# Altium footprint library Dlib.PcbLib: 70 footprints (part 3 of 5)
Each footprint in its own frame and in the unit in brackets; x right, y up, seen from the top. Pads: shape width x height; smd on the part's side, far side on the other; paste and mask are expansions set on the pad; w line width, h text height; cw(c..) or ccw(c..) is an arc to the next point about the centre after c.
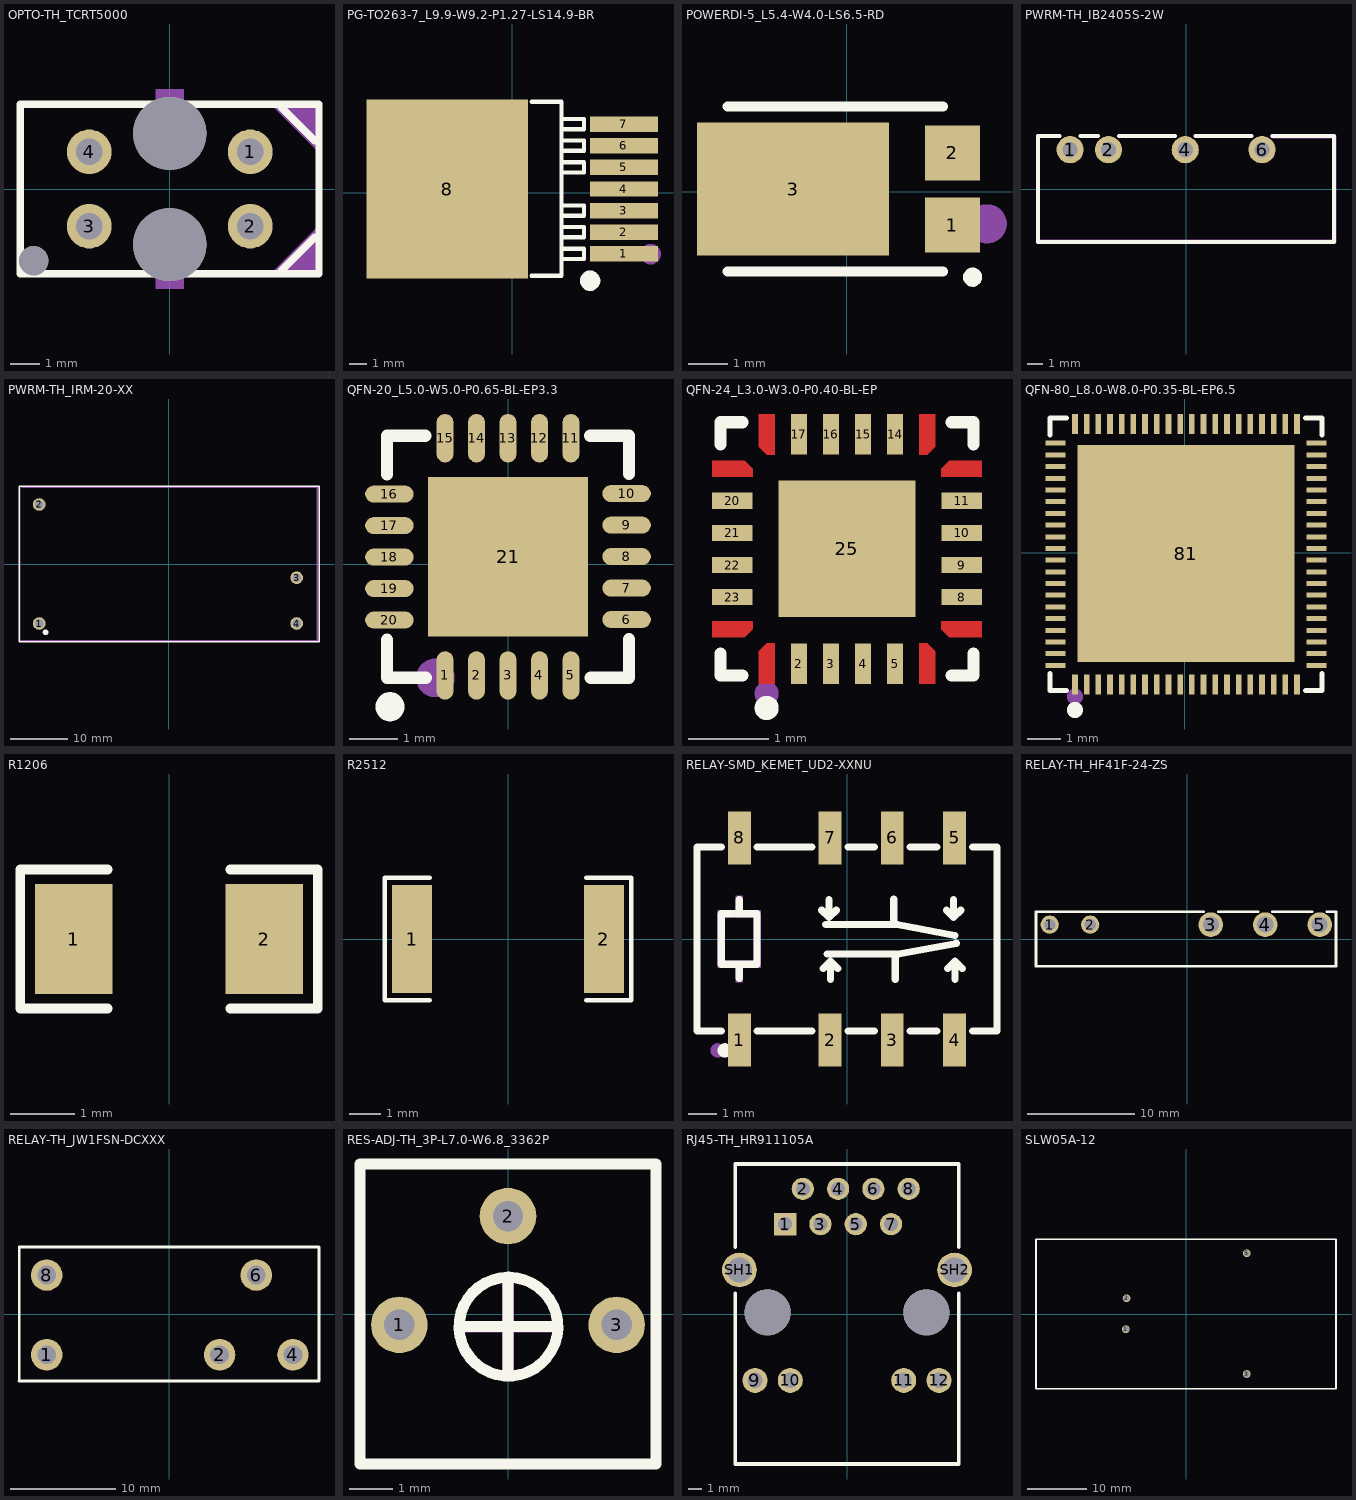
[diagram p2: the footprints below, top view; thin cyan lines are the x and y axes]

## OPTO-TH_TCRT5000 [mil]
pads (7):
  round 60 hole 36 paste-99999 mask+1.97: 1(108.27,50) 2(108.27,-50) 3(-108.26,-50) 4(-108.26,50)
  round 39.37 hole 39.37 unplated paste-99999: ""(-183.06,-96.46)
  round 98.43 hole 98.43 unplated paste-99999: ""(0.01,-74.8) ""(0.01,74.8)
Top Overlay:
  lines w10: 150,-110 195,-65 ; 150,110 195,65 ; -200.78,-114.18 -200.78,114.17 200.78,114.17 200.78,-114.18 -200.78,-114.18
Mechanical 15:
  circle w17.72: c-183.06,-96.46 r8.86
  region: 135.83,-114.17 200.79,-49.21 200.79,-114.17
  region: 135.83,114.17 200.79,49.21 200.79,114.17
  region: 18.71,-133.85 18.71,-86.61 -18.7,-86.61 -18.7,-133.85
  region: 18.71,86.61 18.71,133.86 -18.7,133.86 -18.7,86.61

## PG-TO263-7_L9.9-W9.2-P1.27-LS14.9-BR [mm]
pads (8):
  rect 4x0.9 smd paste+0 mask+0.051: 1(6.565,-3.594) 2(6.565,-2.324) 3(6.565,-1.054) 4(6.565,0.216) 5(6.565,1.486) 6(6.565,2.756) 7(6.565,4.026)
  rect 9.5x10.5 smd paste+0 mask+0.051: 8(-3.815,0.216)
Top Overlay:
  circle w0.6: c4.575,-5.173 r0.3
  lines w0.254: 1.135,-4.884 2.895,-4.884 2.895,-4.784 2.895,5.346 1.155,5.346 ; 2.895,-3.919 2.895,-3.894 4.215,-3.894 4.215,-3.288 2.895,-3.288 ; 2.895,-2.649 2.895,-2.624 4.215,-2.624 4.215,-2.018 2.895,-2.018 ; 2.895,-1.379 2.895,-1.354 4.215,-1.354 4.215,-0.749 2.895,-0.749 ; 2.895,1.161 2.895,1.186 4.215,1.186 4.215,1.792 2.895,1.792 ; 2.895,2.431 2.895,2.456 4.215,2.456 4.215,3.061 2.895,3.061 ; 2.895,3.701 2.895,3.726 4.215,3.726 4.215,4.332 2.895,4.332
Mechanical 15:
  circle w0.6: c8.135,-3.614 r0.3
3D body "BTS7960B--3DModel-STEP-1.STEP": height 4.4, standoff 0, extent -7.45,-4.95 7.45,4.95

## POWERDI-5_L5.4-W4.0-LS6.5-RD [mm]
pads (3):
  rect 1.4x1.4 smd paste+0 mask+0.051: 1(2.688,-0.85) 2(2.688,0.99)
  rect 4.9x3.4 smd paste+0 mask+0.051: 3(-1.376,0.07)
Top Overlay:
  circle w0.254: c3.205,-2.18 r0.117
  lines w0.254: -3.044,-2.03 2.456,-2.03 ; -3.044,2.17 2.456,2.17
Mechanical 15:
  circle w0.5: c3.577,-0.819 r0.25

## PWRM-TH_IB2405S-2W [mm]
pads (4):
  round 1.8 hole 1 paste-2539.97 mask+0.051: 1(-7.67,2.6) 2(-5.13,2.6) 4(-0.05,2.6) 6(5.03,2.6)
Top Overlay:
  lines w0.254: -9.8,3.5 -9.8,-3.5 9.8,-3.5 9.8,3.5 5.714,3.5 ; -9.79,3.5 -8.354,3.5 ; -6.986,3.5 -5.814,3.5 ; -4.446,3.5 -0.734,3.5 ; 0.634,3.5 4.346,3.5
Mechanical 15:
  region: -9.673,3.5 -9.673,-3.373 9.673,-3.373 9.673,3.373 5.714,3.373 5.661,3.373 5.587,3.447 5.587,3.553 5.661,3.627 5.714,3.627 9.8,3.627 9.825,3.627 9.872,3.608 9.908,3.572 9.927,3.525 9.927,3.5 9.927,-3.5 9.927,-3.525 9.908,-3.572 9.872,-3.608 9.825,-3.627 9.8,-3.627 -9.8,-3.627 -9.825,-3.627 -9.872,-3.608 -9.908,-3.572 -9.927,-3.525 -9.927,-3.5 -9.927,3.5 -9.927,3.553 -9.853,3.627 -9.747,3.627 -9.673,3.553
3D body "User Library-uploads_pdf_IB_S-2W.STEP": height 10.16, standoff -4.1, extent -9.825,-3.525 9.825,3.525

## PWRM-TH_IRM-20-XX [mm]
pads (4):
  round 2.2 hole 1.5 paste-2539.97 mask+0.051: 1(-22.664,-10.4) 2(-22.664,10.4) 3(22.336,-2.4) 4(22.336,-10.4)
Top Overlay:
  circle w0.5: c-21.553,-11.938 r0.25
  lines w0.254: -26.164,-13.6 26.236,-13.6 26.236,13.6 -26.164,13.6 -26.164,-13.6
Mechanical 15:
  region: -25.944,13.462 -25.944,-13.335 25.872,-13.335 25.872,13.335 -25.69,13.335 -25.743,13.335 -25.817,13.409 -25.817,13.515 -25.743,13.589 -25.69,13.589 25.999,13.589 26.024,13.589 26.071,13.57 26.106,13.534 26.126,13.487 26.126,13.462 26.126,-13.462 26.126,-13.487 26.106,-13.534 26.071,-13.57 26.024,-13.589 25.999,-13.589 -26.071,-13.589 -26.097,-13.589 -26.143,-13.57 -26.179,-13.534 -26.198,-13.487 -26.198,-13.462 -26.198,13.462 -26.198,13.515 -26.124,13.589 -26.019,13.589 -25.944,13.515
3D body "IRM-20-5--3DModel-STEP-269445.STEP": height 24, standoff -3.5, extent -26.111,-13.564 26.289,13.636

## QFN-20_L5.0-W5.0-P0.65-BL-EP3.3 [mm]
pads (21):
  oval 0.35x1 smd paste-100 mask+0.05: 1(-1.3,-2.302) 2(-0.65,-2.302) 3(0,-2.302) 4(0.65,-2.302) 5(1.301,-2.302) 11(1.3,2.598) 12(0.65,2.598) 13(0,2.598) 14(-0.65,2.598) 15(-1.301,2.598)
  oval 1x0.35 smd paste-100 mask+0.05: 6(2.45,-1.147) 7(2.45,-0.497) 8(2.45,0.153) 9(2.45,0.804) 10(2.45,1.454) 16(-2.45,1.443) 17(-2.45,0.793) 18(-2.45,0.143) 19(-2.45,-0.507) 20(-2.45,-1.158)
  rect 3.3x3.3 smd paste-100 mask+0.05: 21(0,0.148)
Top Overlay:
  lines w0.254: -2.5,-1.564 -2.5,-2.352 -1.702,-2.352 ; -2.5,1.85 -2.5,2.648 -1.712,2.648 ; 1.702,2.648 2.5,2.648 2.5,1.86 ; 1.712,-2.352 2.5,-2.352 2.5,-1.553
  lines w0.3: -2.438,-2.798 ccw(c-2.437,-2.948) -2.436,-2.798
Top Paste:
  drawing of 21 lines, arcs and shapes, not listed
Mechanical 15:
  circle w0.4: c-1.5,-2.352 r0.2
3D body "MCP9600T-E_MX.STEP": height 1, standoff 0, extent -2.5,-2.348 2.5,2.652

## QFN-24_L3.0-W3.0-P0.40-BL-EP [mm]
pads (17):
  rect 0.2x0.505 smd paste-100 mask+0.051: 2(456.51,-344.025) 3(456.91,-344.025) 4(457.31,-344.025) 5(457.71,-344.025) 14(457.71,-341.17) 15(457.31,-341.17) 16(456.91,-341.17) 17(456.51,-341.17)
  rect 0.505x0.2 smd paste-100 mask+0.051: 8(458.538,-343.198) 9(458.538,-342.798) 10(458.538,-342.398) 11(458.538,-341.998) 20(455.683,-341.998) 21(455.683,-342.398) 22(455.683,-342.798) 23(455.683,-343.198)
  rect 1.7x1.7 smd paste-100 mask+0.051: 25(457.11,-342.598)
Top Layer:
  region: 456.01,-340.918 456.21,-340.918 456.21,-341.423 456.11,-341.423 456.01,-341.323
  region: 455.43,-343.698 455.836,-343.698 455.936,-343.598 455.935,-343.498 455.43,-343.498
  region: 458.79,-343.698 458.385,-343.698 458.285,-343.598 458.285,-343.498 458.79,-343.498
  region: 458.79,-341.498 458.385,-341.498 458.285,-341.598 458.285,-341.698 458.79,-341.698
  region: 458.211,-340.918 458.011,-340.918 458.011,-341.423 458.111,-341.423 458.211,-341.323
  region: 456.011,-344.278 456.211,-344.278 456.211,-343.773 456.111,-343.772 456.011,-343.872
  region: 458.211,-344.278 458.011,-344.278 458.011,-343.773 458.111,-343.772 458.211,-343.872
  region: 455.43,-341.498 455.836,-341.498 455.936,-341.598 455.935,-341.698 455.43,-341.698
Top Overlay:
  circle w0.15: c456.11,-344.578 r0.075
  lines w0.152: 455.534,-343.9 455.534,-344.174 455.808,-344.174 ; 455.534,-341.295 455.534,-341.022 455.808,-341.022 ; 458.413,-344.174 458.687,-344.174 458.687,-343.9 ; 458.413,-341.022 458.687,-341.022 458.687,-341.295
Top Paste:
  region: 457.61,-340.918 457.61,-341.423 457.81,-341.423 457.81,-340.918
  region: 456.21,-341.423 456.21,-340.918 456.01,-340.918 456.01,-341.323 456.11,-341.423
  region: 456.611,-341.423 456.611,-340.918 456.411,-340.918 456.411,-341.423
  region: 457.21,-340.918 457.21,-341.423 457.41,-341.423 457.41,-340.918
  region: 457.011,-341.423 457.011,-340.918 456.811,-340.918 456.811,-341.423
  region: 458.211,-341.323 458.211,-340.918 458.011,-340.918 458.011,-341.423 458.111,-341.423
  region: 455.43,-341.498 455.43,-341.698 455.935,-341.698 455.936,-341.598 455.836,-341.498
  region: 458.385,-341.498 458.285,-341.598 458.285,-341.698 458.79,-341.698 458.79,-341.498
  region: 455.43,-341.898 455.43,-342.098 455.935,-342.098 455.935,-341.898
  region: 458.79,-342.098 458.79,-341.898 458.285,-341.898 458.285,-342.098
  region: 455.43,-342.298 455.43,-342.498 455.935,-342.498 455.935,-342.298
  region: 458.79,-342.498 458.79,-342.298 458.285,-342.298 458.285,-342.498
  region: 455.43,-342.698 455.43,-342.898 455.935,-342.898 455.935,-342.698
  region: 458.79,-342.898 458.79,-342.698 458.285,-342.698 458.285,-342.898
  region: 455.43,-343.098 455.43,-343.298 455.935,-343.298 455.935,-343.098
  region: 458.79,-343.298 458.79,-343.098 458.285,-343.098 458.285,-343.298
  region: 455.43,-343.498 455.43,-343.698 455.836,-343.698 455.936,-343.598 455.935,-343.498
  region: 458.79,-343.698 458.79,-343.498 458.285,-343.498 458.285,-343.598 458.385,-343.698
  region: 456.211,-343.773 456.111,-343.772 456.011,-343.872 456.011,-344.278 456.211,-344.278
  region: 458.111,-343.772 458.011,-343.773 458.011,-344.278 458.211,-344.278 458.211,-343.872
  region: 457.81,-344.278 457.81,-343.773 457.61,-343.773 457.61,-344.278
  region: 456.411,-343.773 456.411,-344.278 456.611,-344.278 456.611,-343.773
  region: 457.41,-344.278 457.41,-343.773 457.21,-343.773 457.21,-344.278
  region: 457.011,-344.278 457.011,-343.773 456.811,-343.773 456.811,-344.278
  region: 456.391,-341.878 457.831,-341.878 457.831,-343.318 456.391,-343.318
Mechanical 15:
  circle w0.15: c456.11,-344.398 r0.075

## QFN-80_L8.0-W8.0-P0.35-BL-EP6.5 [mm]
pads (81):
  rect 0.17x0.6 smd paste+0 mask+0.051: 1(-3.291,-3.944) 2(-2.941,-3.944) 3(-2.591,-3.944) 4(-2.241,-3.944) 5(-1.891,-3.944) 6(-1.541,-3.944) 7(-1.191,-3.944) 8(-0.841,-3.944) 9(-0.491,-3.944) 10(-0.141,-3.944) 11(0.209,-3.944) 12(0.559,-3.944) 13(0.909,-3.944) 14(1.259,-3.944) 15(1.609,-3.944) 16(1.959,-3.944) 17(2.309,-3.944) 18(2.659,-3.944) 19(3.009,-3.944) 20(3.36,-3.944) 41(3.36,3.856) 42(3.009,3.856) 43(2.659,3.856) 44(2.309,3.856) 45(1.959,3.856) 46(1.609,3.856) 47(1.259,3.856) 48(0.909,3.856) 49(0.559,3.856) 50(0.209,3.856) 51(-0.141,3.856) 52(-0.491,3.856) 53(-0.841,3.856) 54(-1.191,3.856) 55(-1.541,3.856) 56(-1.891,3.856) 57(-2.241,3.856) 58(-2.591,3.856) 59(-2.941,3.856) 60(-3.291,3.856)
  rect 0.6x0.15 smd paste+0 mask+0.051: 21(3.934,-3.369) 22(3.934,-3.019) 23(3.934,-2.669) 24(3.934,-2.319) 25(3.934,-1.969) 26(3.934,-1.619) 27(3.934,-1.269) 28(3.934,-0.919) 29(3.934,-0.569) 30(3.934,-0.219) 31(3.934,0.131) 32(3.934,0.481) 33(3.934,0.831) 34(3.934,1.181) 35(3.934,1.531) 36(3.934,1.881) 37(3.934,2.231) 38(3.934,2.581) 39(3.934,2.931) 40(3.934,3.281) 61(-3.866,3.281) 62(-3.866,2.931) 63(-3.866,2.581) 64(-3.866,2.231) 65(-3.866,1.881) 66(-3.866,1.531) 67(-3.866,1.181) 68(-3.866,0.831) 69(-3.866,0.481) 70(-3.866,0.131) 71(-3.866,-0.219) 72(-3.866,-0.569) 73(-3.866,-0.919) 74(-3.866,-1.269) 75(-3.866,-1.619) 76(-3.866,-1.969) 77(-3.866,-2.319) 78(-3.866,-2.669) 79(-3.866,-3.019) 80(-3.866,-3.369)
  rect 6.5x6.5 smd paste+0 mask+0.051: 81(0.034,-0.024)
Top Overlay:
  circle w0.24: c-3.291,-4.705 r0.12
  lines w0.152: -4.042,-3.62 -4.042,-4.12 -3.541,-4.12 ; -4.042,3.531 -4.042,4.032 -3.541,4.032 ; 3.61,-4.12 4.111,-4.12 4.111,-3.62 ; 3.61,4.032 4.111,4.032 4.111,3.531
Mechanical 15:
  circle w0.24: c-3.291,-4.305 r0.12
3D body "QFN-80_L8.0-W8.0-P0.35-BL-EP5.5_EasyEDA.step": height 0.73, standoff -0.03, extent -3.985,-4.061 4.035,3.959

## R1206 [mm]
pads (2):
  rect 1.208x1.701 smd paste-100 mask+0.051: 1(-1.479,-3.005) 2(1.479,-3.005)
Top Overlay:
  lines w0.152: -0.951,-4.084 -2.311,-4.084 -2.311,-1.926 -0.951,-1.926 ; 0.951,-4.084 2.311,-4.084 2.311,-1.926 0.951,-1.926
Top Paste:
  region: 0.875,-3.756 0.875,-3.394 0.975,-3.294 1.186,-3.294 1.286,-3.194 1.286,-2.816 1.186,-2.716 0.975,-2.716 0.875,-2.616 0.875,-2.255 0.975,-2.155 1.983,-2.155 2.083,-2.255 2.083,-3.756 1.983,-3.856 0.975,-3.856
  region: -0.875,-3.756 -0.875,-3.394 -0.975,-3.294 -1.186,-3.294 -1.286,-3.194 -1.286,-2.816 -1.186,-2.716 -0.975,-2.716 -0.875,-2.616 -0.875,-2.255 -0.975,-2.155 -1.983,-2.155 -2.083,-2.255 -2.083,-3.756 -1.983,-3.856 -0.975,-3.856

## R2512 [mm]
pads (2):
  rect 1.283x3.456 smd paste-100 mask+0.051: 1(-3.066,0) 2(3.066,0)
Top Overlay:
  lines w0.152: -2.501,-1.957 -3.936,-1.957 -3.936,1.957 -2.501,1.957 ; 2.501,-1.957 3.936,-1.957 3.936,1.957 2.501,1.957
Top Paste:
  region: -2.425,-1.628 -2.425,-0.688 -2.525,-0.588 -2.761,-0.588 -2.861,-0.488 -2.861,0.488 -2.761,0.588 -2.525,0.588 -2.425,0.688 -2.425,1.628 -2.525,1.728 -3.608,1.728 -3.708,1.628 -3.708,-1.628 -3.608,-1.728 -2.525,-1.728
  region: 2.425,-1.628 2.425,-0.688 2.525,-0.588 2.761,-0.588 2.861,-0.488 2.861,0.488 2.761,0.588 2.525,0.588 2.425,0.688 2.425,1.628 2.525,1.728 3.608,1.728 3.708,1.628 3.708,-1.628 3.608,-1.728 2.525,-1.728
3D body "RC2512FK-0733RL.STEP": height 0.65, standoff 0, extent -3.175,-1.55 3.175,1.55

## RELAY-SMD_KEMET_UD2-XXNU [mm]
pads (8):
  rect 0.8x1.86 smd paste+0 mask+0.05: 1(-3.8,-3.57) 2(-0.6,-3.57) 3(1.6,-3.57) 4(3.8,-3.57) 5(3.8,3.57) 6(1.6,3.57) 7(-0.6,3.57) 8(-3.8,3.57)
Top Overlay:
  circle w0.254: c-4.318,-3.937 r0.127
  lines w0.254: -4.431,-3.25 -5.3,-3.25 -5.3,3.25 -4.431,3.25 ; -3.81,-1.397 -3.81,-0.889 ; -3.81,0.889 -3.81,1.397 ; -3.169,-3.25 -1.231,-3.25 ; -3.169,3.25 -1.231,3.25 ; -0.889,1.016 -0.635,0.762 ; -0.838,-1.041 -0.584,-0.787 ; -0.762,0.508 1.778,0.508 3.81,0.127 ; -0.711,-0.533 1.829,-0.533 3.861,-0.152 ; -0.635,1.397 -0.635,0.762 ; -0.584,-1.422 -0.584,-0.787 ; -0.381,1.016 -0.635,0.762 ; -0.33,-1.041 -0.584,-0.787 ; 0.031,-3.25 0.969,-3.25 ; 0.031,3.25 0.969,3.25 ; 1.651,0.508 1.651,1.409 ; 1.702,-1.434 1.702,-0.533 ; 2.231,-3.25 3.169,-3.25 ; 2.231,3.25 3.169,3.25 ; 3.511,1.016 3.765,0.762 ; 3.562,-1.041 3.816,-0.787 ; 3.765,1.397 3.765,0.762 ; 3.816,-1.422 3.816,-0.787 ; 4.019,1.016 3.765,0.762 ; 4.07,-1.041 3.816,-0.787 ; 4.431,-3.25 5.3,-3.25 5.3,3.25 4.431,3.25 ; -4.445,-0.889 -4.445,0.889 -3.175,0.889 -3.175,-0.889 -4.445,-0.889
Mechanical 15:
  circle w0.254: c-4.572,-3.937 r0.127
  region: -3.937,1.524 -3.683,1.524 -3.683,1.016 -3.048,1.016 -3.048,-1.016 -3.683,-1.016 -3.683,-1.524 -3.937,-1.524 -3.937,-1.016 -4.572,-1.016 -4.572,1.016 -4.064,1.016 -4.064,0.762 -4.318,0.762 -4.318,-0.762 -3.302,-0.762 -3.302,0.635 -3.302,0.762 -3.937,0.762

## RELAY-TH_HF41F-24-ZS [mm]
pads (5):
  round 1.7 hole 1.1 paste-2539.97 mask+0.051: 1(-12.823,1.34) 2(-9.043,1.34)
  round 2.3 hole 1.5 paste-2539.97 mask+0.051: 3(2.217,1.34) 4(7.297,1.34) 5(12.377,1.34)
Top Overlay:
  lines w0.254: 1.536,2.54 -14.1,2.54 -14.1,-2.54 13.901,-2.54 13.901,2.54 13.058,2.54 ; 2.898,2.54 6.616,2.54 ; 7.978,2.54 11.696,2.54
3D body "Relay v2.step": height 14.5, standoff -4, extent -13.74,-2.5 14.26,2.6

## RELAY-TH_JW1FSN-DCXXX [mm]
pads (5):
  round 3 hole 1.8 paste-2539.97 mask+0.051: 1(-11.671,-3.886) 2(4.829,-3.886) 4(11.829,-3.886) 6(8.329,3.713) 8(-11.671,3.713)
Top Overlay:
  lines w0.254: -14.313,-6.401 14.287,-6.401 ; -14.287,-6.398 -14.287,6.401 14.313,6.401 ; 14.313,-6.401 14.313,6.398
3D body "User Library-RELAY_JW1.STEP": height 20, standoff -3.6, extent -14.148,-6.349 14.452,6.451

## RES-ADJ-TH_3P-L7.0-W6.8_3362P [mm]
pads (3):
  round 1.3 hole 0.7 paste-2539.97 mask+0.051: 1(-2.5,-0.25) 2(0,2.25) 3(2.5,-0.25)
Top Overlay:
  lines w0.254: -1.016,-0.29 1.016,-0.29 ; 0,-1.306 0,0.726 ; 0,0.845 ccw(c0.01,-0.291) 0.02,0.845 ; -3.4,-3.45 3.4,-3.45 3.4,3.45 -3.4,3.45 -3.4,-3.45
Mechanical 15:
  region: 1.016,-0.417 -1.016,-0.417 -1.069,-0.417 -1.143,-0.343 -1.143,-0.237 -1.069,-0.163 -1.016,-0.163 1.016,-0.163 1.069,-0.163 1.143,-0.237 1.143,-0.343 1.069,-0.417
  region: -0.127,-1.306 -0.127,0.726 -0.127,0.779 -0.053,0.853 0.053,0.853 0.127,0.779 0.127,0.726 0.127,-1.306 0.127,-1.359 0.053,-1.433 -0.053,-1.433 -0.127,-1.359

## RJ45-TH_HR911105A [mm]
pads (16):
  rect 1.6x1.6 hole 1 paste-2539.97 mask+0.051: 1(-4.45,6.486)
  round 1.6 hole 1 paste-2539.97 mask+0.051: 2(-3.18,9.026) 3(-1.91,6.486) 4(-0.64,9.026) 5(0.63,6.486) 6(1.9,9.026) 7(3.17,6.486) 8(4.44,9.026)
  round 1.8 hole 1.1 paste-2539.97 mask+0.051: 9(-6.625,-4.763) 10(-4.085,-4.763) 11(4.085,-4.763) 12(6.625,-4.763)
  round 2.5 hole 1.8 paste-2539.97 mask+0.051: SH1(-7.745,3.187) SH2(7.745,3.187)
  round 3.3 hole 3.3 unplated paste-2539.97: ""(-5.715,0.136) ""(5.715,0.136)
Top Overlay:
  lines w0.254: -8.05,1.517 -8.05,-10.784 8.05,-10.784 8.05,1.517 ; -8.05,4.816 -8.05,10.816 8.05,10.816 8.05,4.816
Mechanical 15:
  circle w1.4: c5.715,0.136 r0.7
  circle w1.4: c-5.715,0.136 r0.7
  circle w0.2: c-5.03,7.091 r0.1
3D body "HR911105A_C12074.step": height 13.84, standoff -3.3, extent -7.934,-11.2 7.934,10.4

## SLW05A-12 [mm]
pads (4):
  round 1.3 hole 1 paste-2539.97 mask+0.35: 1(-10.163,-2.563) 2(-10.037,2.663) 3(10.264,-10.137) 5(10.264,10.264)
Top Overlay:
  lines w0.254: -25.336,-12.636 25.336,-12.636 25.336,12.636 -25.336,12.636 -25.336,-12.636